# Altium schematic symbol library Integrated Circuits.SchLib: 166 symbols (part 2 of 2)

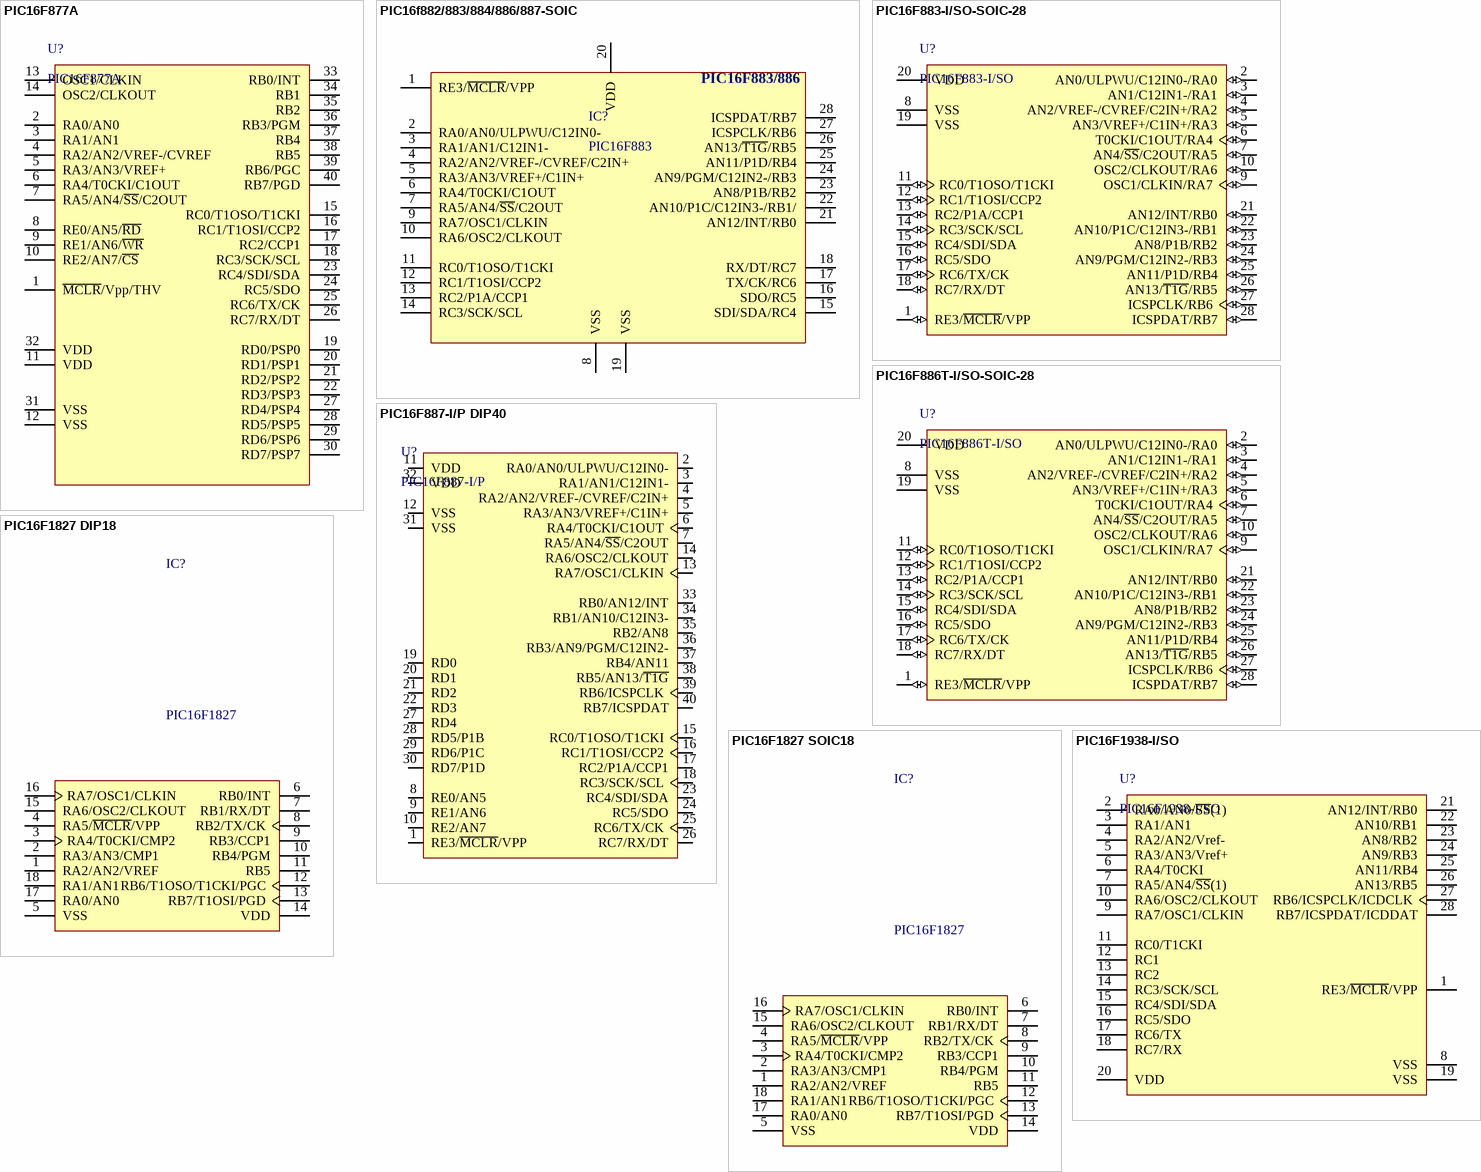
[diagram p5: symbols PIC16F877A to PIC16F1938-I/SO]

## PIC16F877A
designator U?
PIC16 Microcontrollers (MCU) 14KB 368 RAM 33 I/O; Code: 7204-037; ComponentLink1Description: Datasheet; ComponentLink2Description: Package Specification; ComponentLink3URL: Product URL:http://www.microchip.com/datasheet/PIC18F452; ComponentLink1URL: http://ww1.microchip.com/downloads/en/DeviceDoc/39564c.pdf; ComponentLink2URL: http://www.microchip.com/stellent/groups/techpub_sg/documents/packagingspec/en012702.pdf; ComponentLink3Description: URL Link1
footprint DIP_40DW (DIP, pitch 2.54mm, 600mil Width)
pins: 1 ~{MCLR}/Vpp/THV, 2 RA0/AN0, 3 RA1/AN1, 4 RA2/AN2/VREF-/CVREF, 5 RA3/AN3/VREF+, 6 RA4/T0CKI/C1OUT (power) "Ground reference for logic and I/O pins.", 7 RA5/AN4/~{SS}/C2OUT (power) "Positive supply for logic and I/O pins.", 8 RE0/AN5/~{RD}, 9 RE1/AN6/~{WR}, 10 RE2/AN7/~{CS}, 11 VDD, 12 VSS "These pins should be left unconnected.", 13 OSC1/CLKIN "These pins should be left unconnected.", 14 OSC2/CLKOUT "PORTB is a bi-directional I/O port. PORTB can be software programmed for internal weak pull-ups on all inputs. Digital I/O. Interrupt-on-change pin.", 15 RC0/T1OSO/T1CKI, 16 RC1/T1OSI/CCP2, 17 RC2/CCP1, 18 RC3/SCK/SCL, 19 RD0/PSP0, 20 RD1/PSP1, 21 RD2/PSP2, 22 RD3/PSP3, 23 RC4/SDI/SDA, 24 RC5/SDO, 25 RC6/TX/CK, 26 RC7/RX/DT, 27 RD4/PSP4, 28 RD5/PSP5 (power) "Positive supply for logic and I/O pins.", 29 RD6/PSP6 (power) "Ground reference for logic and I/O pins.", 30 RD7/PSP7, 31 VSS, 32 VDD, 33 RB0/INT "These pins should be left unconnected.", 34 RB1 "These pins should be left unconnected.", 35 RB2, 36 RB3/PGM, 37 RB4, 38 RB5, 39 RB6/PGC, 40 RB7/PGD

## PIC16f882/883/884/886/887-SOIC
designator IC?, comment PIC16F883
PIC16F883/886-SOIC28-Enhanced Flash-Based 8-Bit / CMOS Microcontrollers with / nanoWatt Technology; Designed by: TranLuyen; Code: N/A
footprint SOIC-28 (SOIC-28 Body 17.9x7.5x2.05mm, Pitch 1.27mm)
pins: 1 RE3/~{MCLR}/VPP, 2 RA0/AN0/ULPWU/C12IN0-, 3 RA1/AN1/C12IN1-, 4 RA2/AN2/VREF-/CVREF/C2IN+, 5 RA3/AN3/VREF+/C1IN+, 6 RA4/T0CKI/C1OUT, 7 RA5/AN4/~{SS}/C2OUT, 8 VSS, 9 RA7/OSC1/CLKIN, 10 RA6/OSC2/CLKOUT, 11 RC0/T1OSO/T1CKI, 12 RC1/T1OSI/CCP2, 13 RC2/P1A/CCP1, 14 RC3/SCK/SCL, 15 SDI/SDA/RC4, 16 SDO/RC5, 17 TX/CK/RC6, 18 RX/DT/RC7, 19 VSS, 20 VDD, 21 AN12/INT/RB0, 22 AN10/P1C/C12IN3-/RB1/, 23 AN8/P1B/RB2, 24 AN9/PGM/C12IN2-/RB3, 25 AN11/P1D/RB4, 26 AN13/~{T1G}/RB5, 27 ICSPCLK/RB6, 28 ICSPDAT/RB7
text: PIC16F883/886

## PIC16F883-I/SO-SOIC-28
designator U?, comment PIC16F883-I/SO
Flash-Based, 8-Bit CMOS Microcontroller with nanoWatt Technology, 8K (x14-Bit words) Program Memory, 624 Bytes Data Memory, 24 I/O pins, 28-Pin SOIC, Standard VDD Range, Industrial Temperature, Tape and Reel; Code: 7204-069; Designed by: TranLuyen; ComponentLink1Description: Datasheet; ComponentLink1URL: http://ww1.microchip.com/downloads/en/devicedoc/41291d.pdf
footprint SOIC-28 (SOIC-28 Body 17.9x7.5x2.05mm, Pitch 1.27mm)
pins: 1 RE3/~{MCLR}/VPP (io), 2 AN0/ULPWU/C12IN0-/RA0 (io), 3 AN1/C12IN1-/RA1 (io), 4 AN2/VREF-/CVREF/C2IN+/RA2 (io), 5 AN3/VREF+/C1IN+/RA3 (io), 6 T0CKI/C1OUT/RA4 (io), 7 AN4/~{SS}/C2OUT/RA5 (io), 8 VSS (power), 9 OSC1/CLKIN/RA7 (io), 10 OSC2/CLKOUT/RA6 (io), 11 RC0/T1OSO/T1CKI (io), 12 RC1/T1OSI/CCP2 (io), 13 RC2/P1A/CCP1 (io), 14 RC3/SCK/SCL (io), 15 RC4/SDI/SDA (io), 16 RC5/SDO (io), 17 RC6/TX/CK (io), 18 RC7/RX/DT (io), 19 VSS (power), 20 VDD (power), 21 AN12/INT/RB0 (io), 22 AN10/P1C/C12IN3-/RB1 (io), 23 AN8/P1B/RB2 (io), 24 AN9/PGM/C12IN2-/RB3 (io), 25 AN11/P1D/RB4 (io), 26 AN13/~{T1G}/RB5 (io), 27 ICSPCLK/RB6 (io), 28 ICSPDAT/RB7 (io)

## PIC16F886T-I/SO-SOIC-28
designator U?, comment PIC16F886T-I/SO
Flash-Based, 8-Bit CMOS Microcontroller with nanoWatt Technology, 8K (x14-Bit words) Program Memory, 624 Bytes Data Memory, 24 I/O pins, 28-Pin SOIC, Standard VDD Range, Industrial Temperature, Tape and Reel; Code: 7204-064; Designed by: TranLuyen; ComponentLink1Description: Datasheet; ComponentLink1URL: http://ww1.microchip.com/downloads/en/devicedoc/41291d.pdf
footprint SOIC-28 (SOIC-28 Body 17.9x7.5x2.05mm, Pitch 1.27mm)
pins: 1 RE3/~{MCLR}/VPP (io), 2 AN0/ULPWU/C12IN0-/RA0 (io), 3 AN1/C12IN1-/RA1 (io), 4 AN2/VREF-/CVREF/C2IN+/RA2 (io), 5 AN3/VREF+/C1IN+/RA3 (io), 6 T0CKI/C1OUT/RA4 (io), 7 AN4/~{SS}/C2OUT/RA5 (io), 8 VSS (power), 9 OSC1/CLKIN/RA7 (io), 10 OSC2/CLKOUT/RA6 (io), 11 RC0/T1OSO/T1CKI (io), 12 RC1/T1OSI/CCP2 (io), 13 RC2/P1A/CCP1 (io), 14 RC3/SCK/SCL (io), 15 RC4/SDI/SDA (io), 16 RC5/SDO (io), 17 RC6/TX/CK (io), 18 RC7/RX/DT (io), 19 VSS (power), 20 VDD (power), 21 AN12/INT/RB0 (io), 22 AN10/P1C/C12IN3-/RB1 (io), 23 AN8/P1B/RB2 (io), 24 AN9/PGM/C12IN2-/RB3 (io), 25 AN11/P1D/RB4 (io), 26 AN13/~{T1G}/RB5 (io), 27 ICSPCLK/RB6 (io), 28 ICSPDAT/RB7 (io)

## PIC16F887-I/P DIP40
designator U?, comment PIC16F887-I/P
Flash-Based, 8-Bit CMOS Microcontroller with nanoWatt Technology, 8K (x14-Bit words) Program Memory, 624 Bytes Data Memory, 35 I/O pins, 40-Pin PDIP, Standard VDD Range, Industrial Temperature; Code: 7204-039; Code_sub1: 5401-013
footprint DIP_40DW (DIP, pitch 2.54mm, 600mil Width)
pins: 1 RE3/~{MCLR}/VPP, 2 RA0/AN0/ULPWU/C12IN0-, 3 RA1/AN1/C12IN1-, 4 RA2/AN2/VREF-/CVREF/C2IN+, 5 RA3/AN3/VREF+/C1IN+, 6 RA4/T0CKI/C1OUT, 7 RA5/AN4/~{SS}/C2OUT, 8 RE0/AN5, 9 RE1/AN6, 10 RE2/AN7, 11 VDD, 12 VSS, 13 RA7/OSC1/CLKIN, 14 RA6/OSC2/CLKOUT, 15 RC0/T1OSO/T1CKI, 16 RC1/T1OSI/CCP2, 17 RC2/P1A/CCP1, 18 RC3/SCK/SCL, 19 RD0, 20 RD1, 21 RD2, 22 RD3, 23 RC4/SDI/SDA, 24 RC5/SDO, 25 RC6/TX/CK, 26 RC7/RX/DT, 27 RD4, 28 RD5/P1B, 29 RD6/P1C, 30 RD7/P1D, 31 VSS, 32 VDD, 33 RB0/AN12/INT, 34 RB1/AN10/C12IN3-, 35 RB2/AN8, 36 RB3/AN9/PGM/C12IN2-, 37 RB4/AN11, 38 RB5/AN13/~{T1G}, 39 RB6/ICSPCLK, 40 RB7/ICSPDAT

## PIC16F1827 DIP18
designator IC?, comment PIC16F1827
16F1827 DIP18, nho xuat de (IC18 5401-005); Code: 7204-045; Code_sub1: 5401-005
footprint DIP_18 (DIP, pitch 2.54mm, 300mil Width)
pins: 1 RA2/AN2/VREF, 2 RA3/AN3/CMP1, 3 RA4/T0CKI/CMP2, 4 RA5/~{MCLR}/VPP, 5 VSS, 6 RB0/INT, 7 RB1/RX/DT, 8 RB2/TX/CK, 9 RB3/CCP1, 10 RB4/PGM, 11 RB5, 12 RB6/T1OSO/T1CKI/PGC, 13 RB7/T1OSI/PGD, 14 VDD, 15 RA6/OSC2/CLKOUT, 16 RA7/OSC1/CLKIN, 17 RA0/AN0, 18 RA1/AN1

## PIC16F1827 SOIC18
designator IC?, comment PIC16F1827
PIC 16F1827 SOIC18; Code: 7204-045-2
footprint SO_18_W (SOP, SOIC, 7.5mm width, 1.27mm pitch,)
pins: 1 RA2/AN2/VREF, 2 RA3/AN3/CMP1, 3 RA4/T0CKI/CMP2, 4 RA5/~{MCLR}/VPP, 5 VSS, 6 RB0/INT, 7 RB1/RX/DT, 8 RB2/TX/CK, 9 RB3/CCP1, 10 RB4/PGM, 11 RB5, 12 RB6/T1OSO/T1CKI/PGC, 13 RB7/T1OSI/PGD, 14 VDD, 15 RA6/OSC2/CLKOUT, 16 RA7/OSC1/CLKIN, 17 RA0/AN0, 18 RA1/AN1

## PIC16F1938-I/SO
designator U?
Flash-Based, 8-Bit CMOS Microcontroller with LCD Driver with nanoWatt XLP Technology, 32 MHz, 24 I/O, -40 to 85 degC, 28-pin SOIC (SO28), Tube; Manufacturer: Microchip; EEPROM Data Memory (bytes): 256; Internal Oscillator: 32 MHz, 31 kHz; Program Memory KWords: 16; I/O Pins: 24; RAM: 1024; Max. CPU Speed MHz: 32; Operation Voltage Range: 1.8V - 5.5V; Digital Communication: 1 -A/E/USART, 1 -MSSP(SPI/I2C); Timers: 4 - 8-bit, 1 - 16-bit, 0 - 32-bit; Program Memory KBytes: 28; # of A/D Channels: 11; Memory Type: Flash; Code: 7204-236; PartNumber: PIC16F1938-I/SO; ComponentLink1Description: Datasheet; ComponentLink2Description: Package Specification; DatasheetVersion: Rev. B; ComponentLink3URL: Product URL:http://www.microchip.com/datasheet/PIC16F1938; ComponentLink1URL: http://ww1.microchip.com/downloads/en/DeviceDoc/41574B.pdf; Packing: TUBE; ComponentLink2URL: http://www.microchip.com/stellent/groups/techpub_sg/documents/packagingspec/en012702.pdf; PackageReference: SOIC-SO28; ComponentLink3Description: URL Link1; PackageVersion: C04-052C, 12/2012; RoHS: TRUE; Mounting Technology: Surface Mount; PackageDescription: 28-Lead Plastic Small Outline, 17.9 x 7.5 mm Body, 1.27 mm Pitch
footprint SOIC-28 (SOIC-28 Body 17.9x7.5x2.05mm, Pitch 1.27mm)
pins: 1 RE3/~{MCLR}/VPP, 2 RA0/AN0/~{SS}(1), 3 RA1/AN1, 4 RA2/AN2/Vref-, 5 RA3/AN3/Vref+, 6 RA4/T0CKI, 7 RA5/AN4/~{SS}(1), 8 VSS "Ground reference.", 9 RA7/OSC1/CLKIN, 10 RA6/OSC2/CLKOUT, 11 RC0/T1CKI, 12 RC1, 13 RC2, 14 RC3/SCK/SCL, 15 RC4/SDI/SDA, 16 RC5/SDO, 17 RC6/TX, 18 RC7/RX, 19 VSS "Ground reference.", 20 VDD "Positive supply.", 21 AN12/INT/RB0, 22 AN10/RB1, 23 AN8/RB2, 24 AN9/RB3, 25 AN11/RB4, 26 AN13/RB5, 27 RB6/ICSPCLK/ICDCLK, 28 RB7/ICSPDAT/ICDDAT

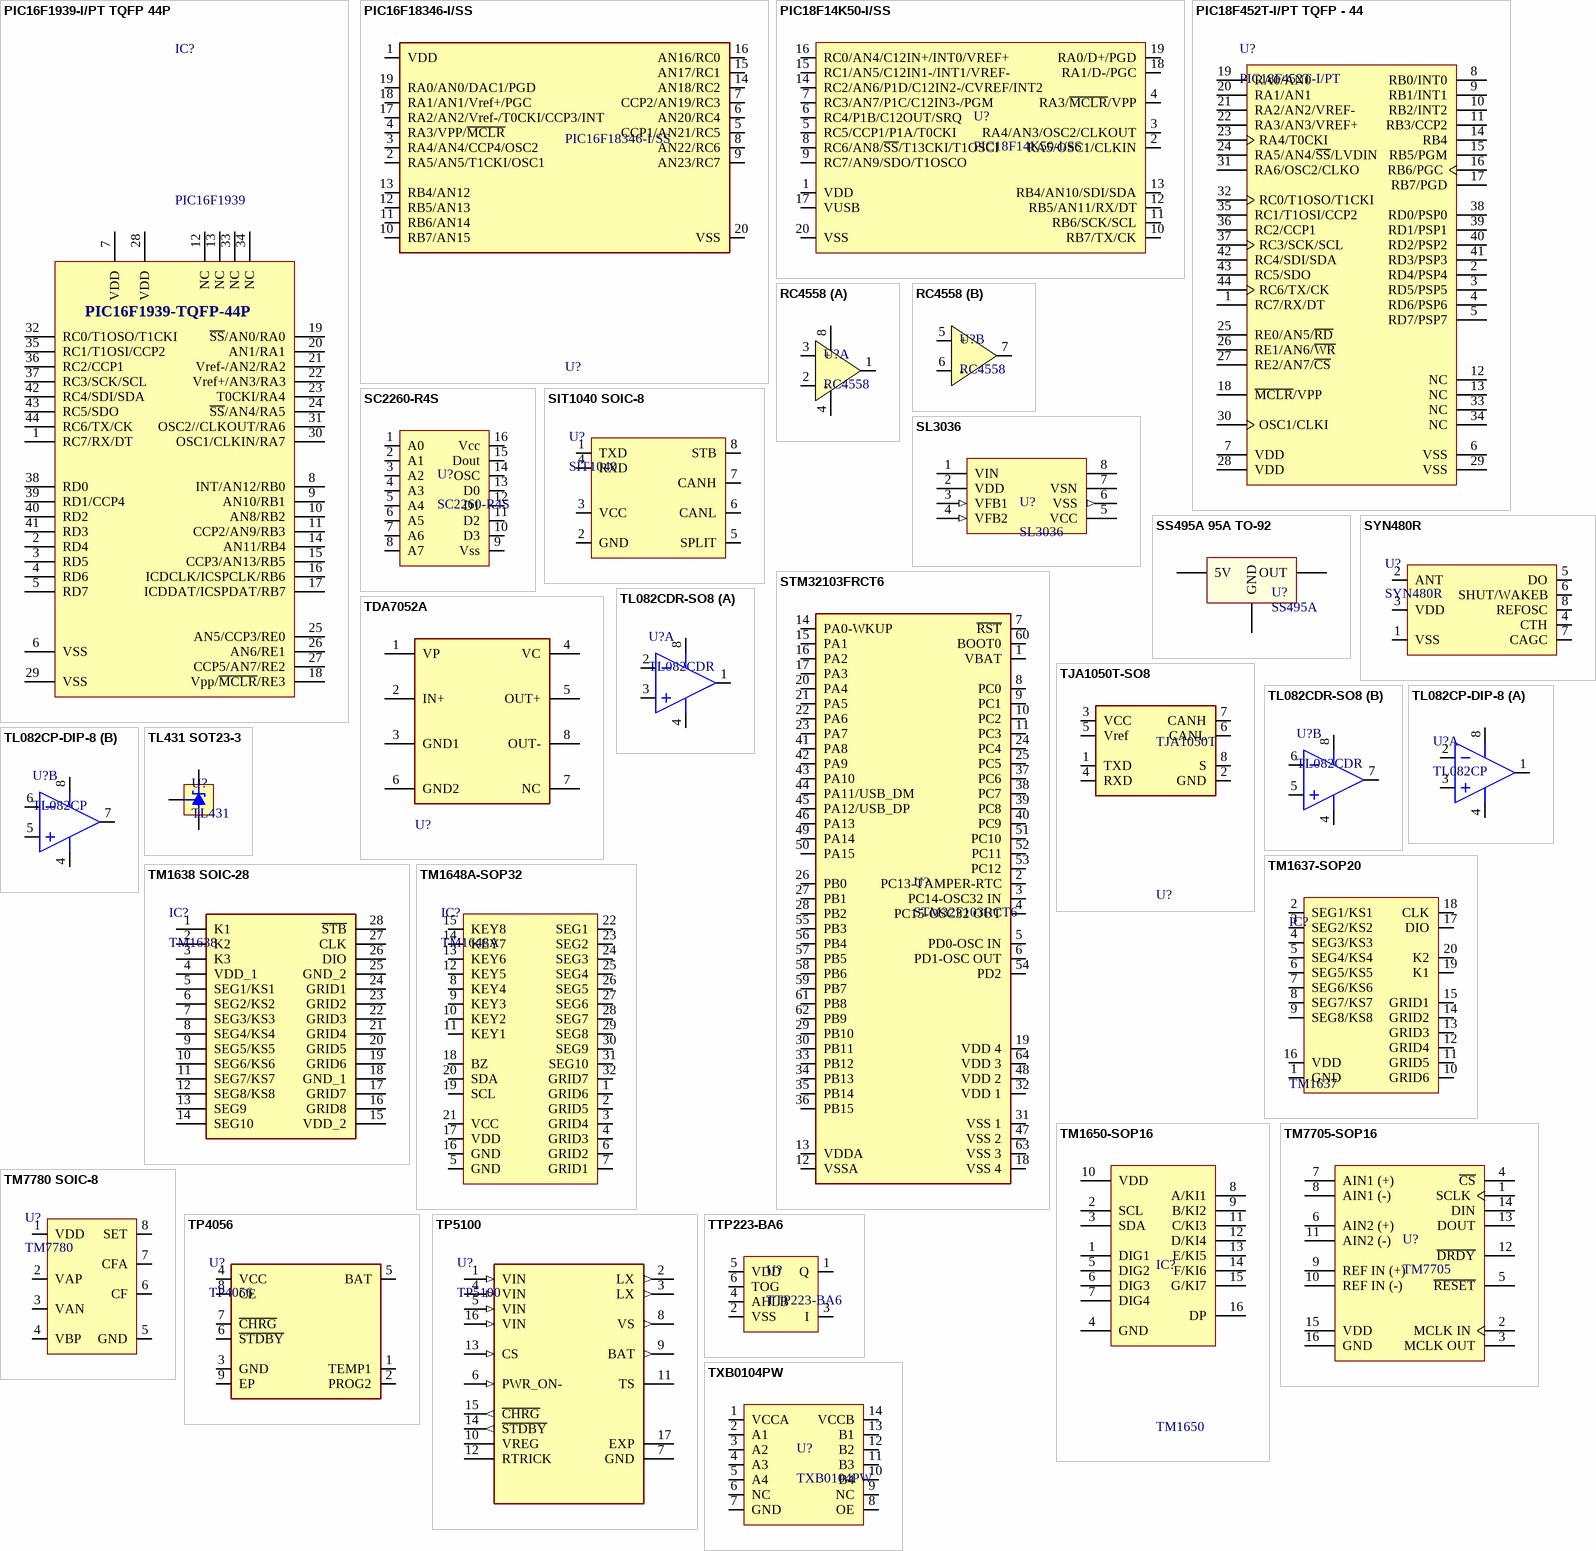
[diagram p6: symbols PIC16F1939-I/PT TQFP 44P to TXB0104PW]

## PIC16F1939-I/PT TQFP 44P
designator IC?, comment PIC16F1939
PIC16F1939-I/PT 44P-TQFP; Code: 7204-239; Designed by: TranLuyen
footprint QFG80_44 (TQFP44, PQFP44, A44 (Cypress), QFP44/MQFP44N (Dallas), VQ44,VQG44 (Xilinx), MS-026ACB, MS-022AB(JEDEC), 44A, 10X10, 0.8mm)
pins: 1 RC7/RX/DT, 2 RD4, 3 RD5, 4 RD6, 5 RD7, 6 VSS (power), 7 VDD (power), 8 INT/AN12/RB0, 9 AN10/RB1, 10 AN8/RB2, 11 CCP2/AN9/RB3, 12 NC, 13 NC, 14 AN11/RB4, 15 CCP3/AN13/RB5, 16 ICDCLK/ICSPCLK/RB6, 17 ICDDAT/ICSPDAT/RB7, 18 Vpp/~{MCLR}/RE3, 19 ~{SS}/AN0/RA0, 20 AN1/RA1, 21 Vref-/AN2/RA2, 22 Vref+/AN3/RA3, 23 T0CKI/RA4, 24 ~{SS}/AN4/RA5, 25 AN5/CCP3/RE0, 26 AN6/RE1, 27 CCP5/AN7/RE2, 28 VDD (power), 29 VSS (power), 30 OSC1/CLKIN/RA7, 31 OSC2//CLKOUT/RA6, 32 RC0/T1OSO/T1CKI, 33 NC, 34 NC, 35 RC1/T1OSI/CCP2, 36 RC2/CCP1, 37 RC3/SCK/SCL, 38 RD0, 39 RD1/CCP4, 40 RD2, 41 RD3, 42 RC4/SDI/SDA, 43 RC5/SDO, 44 RC6/TX/CK
text: PIC16F1939-TQFP-44P

## PIC16F18346-I/SS
designator U?
IC MCU 8BIT 28KB FLASH 20SSOP; Code: N/A
footprint SOG65_20_W (SSOP20, TSSOP20, RU-20, RQ-20, DB, pitch: 0.65mm, 7X5.3mm, QSP, SOT339-1, SOT266-1, AT-260, TSSO6X6-G20, NP20, MO-153AC, MO-150AE, MO-137-AD, MO-152)
pins: 1 VDD, 2 RA5/AN5/T1CKI/OSC1, 3 RA4/AN4/CCP4/OSC2, 4 RA3/VPP/~{MCLR}, 5 CCP1/AN21/RC5, 6 AN20/RC4, 7 CCP2/AN19/RC3, 8 AN22/RC6, 9 AN23/RC7, 10 RB7/AN15, 11 RB6/AN14, 12 RB5/AN13, 13 RB4/AN12, 14 AN18/RC2, 15 AN17/RC1, 16 AN16/RC0, 17 RA2/AN2/Vref-/T0CKI/CCP3/INT, 18 RA1/AN1/Vref+/PGC, 19 RA0/AN0/DAC1/PGD, 20 VSS

## PIC18F14K50-I/SS
designator U?
USB Flash Microcontroller with nanoWatt XLP Technology, 20-pin SSOP, Industrial Temperature; Code: 7204-245; Desinged by: TranLuyen
footprint SOG65_20_W (SSOP20, TSSOP20, RU-20, RQ-20, DB, pitch: 0.65mm, 7X5.3mm, QSP, SOT339-1, SOT266-1, AT-260, TSSO6X6-G20, NP20, MO-153AC, MO-150AE, MO-137-AD, MO-152)
pins: 1 VDD, 2 RA5/OSC1/CLKIN, 3 RA4/AN3/OSC2/CLKOUT, 4 RA3/~{MCLR}/VPP, 5 RC5/CCP1/P1A/T0CKI, 6 RC4/P1B/C12OUT/SRQ, 7 RC3/AN7/P1C/C12IN3-/PGM, 8 RC6/AN8/~{SS}/T13CKI/T1OSCI, 9 RC7/AN9/SDO/T1OSCO, 10 RB7/TX/CK, 11 RB6/SCK/SCL, 12 RB5/AN11/RX/DT, 13 RB4/AN10/SDI/SDA, 14 RC2/AN6/P1D/C12IN2-/CVREF/INT2, 15 RC1/AN5/C12IN1-/INT1/VREF-, 16 RC0/AN4/C12IN+/INT0/VREF+, 17 VUSB, 18 RA1/D-/PGC, 19 RA0/D+/PGD, 20 VSS

## PIC18F452T-I/PT TQFP - 44
designator U?, comment PIC18F452T-I/PT
High Performance, Enhanced Flash Microcontroller with 10-Bit A/D, 40 MHz, 34 I/O, -40 to 85 degC, 44-pin TQFP (PT44), Tape and Reel; Manufacturer: Microchip; EEPROM Data Memory (bytes): 256; Program Memory KWords: 16; I/O Pins: 34; RAM: 1536; Max. CPU Speed MHz: 40; Packing: T/R; Operation Voltage Range: 2V - 5.5V; Digital Communication: 0 -UART, 1 -A/E/USART, 0 -SPI, 0 -I2C, 1 -MSSP(SPI/I2C); Timers: 1 - 8-bit, 3 - 16-bit, 0 - 32-bit; Program Memory KBytes: 32; # of A/D Channels: 8; Code: 7204-103; Designed by: TranLuyen; PartNumber: PIC18F452T-I/PT; ComponentLink1Description: Datasheet; ComponentLink2Description: Package Specification; ComponentLink3URL: Product URL:http://www.microchip.com/datasheet/PIC18F452; ComponentLink1URL: http://ww1.microchip.com/downloads/en/DeviceDoc/39564c.pdf; ComponentLink2URL: http://www.microchip.com/stellent/groups/techpub_sg/documents/packagingspec/en012702.pdf; ComponentLink3Description: URL Link1; PackageVersion: C04-076B, 12/2012; RoHS: TRUE; Memory Type: Flash; Mounting Technology: Surface Mount; PackageReference: TQFP-PT44; PackageDescription: 44-Lead Plastic Thin Quad Flatpack, 10 x 10 mm Body, 0.8 mm Pitch
footprint QFG80_44 (TQFP44, PQFP44, A44 (Cypress), QFP44/MQFP44N (Dallas), VQ44,VQG44 (Xilinx), MS-026ACB, MS-022AB(JEDEC), 44A, 10X10, 0.8mm)
pins: 1 RC7/RX/DT, 2 RD4/PSP4, 3 RD5/PSP5, 4 RD6/PSP6, 5 RD7/PSP7, 6 VSS (power) "Ground reference for logic and I/O pins.", 7 VDD (power) "Positive supply for logic and I/O pins.", 8 RB0/INT0, 9 RB1/INT1, 10 RB2/INT2, 11 RB3/CCP2, 12 NC "These pins should be left unconnected.", 13 NC "These pins should be left unconnected.", 14 RB4 "PORTB is a bi-directional I/O port. PORTB can be software programmed for internal weak pull-ups on all inputs. Digital I/O. Interrupt-on-change pin.", 15 RB5/PGM, 16 RB6/PGC, 17 RB7/PGD, 18 ~{MCLR}/VPP, 19 RA0/AN0, 20 RA1/AN1, 21 RA2/AN2/VREF-, 22 RA3/AN3/VREF+, 23 RA4/T0CKI, 24 RA5/AN4/~{SS}/LVDIN, 25 RE0/AN5/~{RD}, 26 RE1/AN6/~{WR}, 27 RE2/AN7/~{CS}, 28 VDD (power) "Positive supply for logic and I/O pins.", 29 VSS (power) "Ground reference for logic and I/O pins.", 30 OSC1/CLKI, 31 RA6/OSC2/CLKO, 32 RC0/T1OSO/T1CKI, 33 NC "These pins should be left unconnected.", 34 NC "These pins should be left unconnected.", 35 RC1/T1OSI/CCP2, 36 RC2/CCP1, 37 RC3/SCK/SCL, 38 RD0/PSP0, 39 RD1/PSP1, 40 RD2/PSP2, 41 RD3/PSP3, 42 RC4/SDI/SDA, 43 RC5/SDO, 44 RC6/TX/CK

## RC4558
designator U?
RC4558 Dual General-Purpose Operational Amplifier; Code: 5011-057
footprint SO_8 (SOP-8, 5x3.9mm body 1.27mm pitch, SOT96-1, M08A, S8, SOIC8, VO8, MS-012AA(JEDEC), R-8, 8S2, VOG8)
part A pins: 1, 2 -, 3 +, 4, 8
part B pins: 5 +, 6 -, 7

## SC2260-R4S
designator U?
SC2260-R4S / Remote Control Encoder; Code: 5015-136
footprint SO_16 (SOP, SOIC, 3.9mm width, 1.27mm pitch,)
pins: 1 A0, 2 A1, 3 A2, 4 A3, 5 A4, 6 A5, 7 A6, 8 A7, 9 Vss, 10 D3, 11 D2, 12 D1, 13 D0, 14 OSC, 15 Dout, 16 Vcc

## SIT1040 SOIC-8
designator U?, comment SIT1040
5V，±40V BUS Protection，1Mbps High Speed CAN transceiver; Code: N/A
footprint SO_8 (SOP-8, 5x3.9mm body 1.27mm pitch, SOT96-1, M08A, S8, SOIC8, VO8, MS-012AA(JEDEC), R-8, 8S2, VOG8)
pins: 1 TXD, 2 GND, 3 VCC, 4 RXD, 5 SPLIT, 6 CANL, 7 CANH, 8 STB

## SL3036
designator U?
Designed by: nhox; Code: 5010-015-1
footprint SO_8 (SOP-8, 5x3.9mm body 1.27mm pitch, SOT96-1, M08A, S8, SOIC8, VO8, MS-012AA(JEDEC), R-8, 8S2, VOG8)
pins: 1 VIN, 2 VDD, 3 VFB1 (in), 4 VFB2 (in), 5 VCC, 6 VSS (out), 7 VSN, 8 VSP

## SS495A 95A TO-92
designator U?, comment SS495A
SS495A 95A TO-92 IC hall; Code: N/A
footprint QTO-92 (TO-92)
pins: 1 5V, 2 GND, 3 OUT

## STM32103FRCT6
designator U?, comment STM32F103RCT6
STM32F103RCT6, LQFP64; Code: 7203-028; Designed by: Nhox
footprint QFG50_64 (A64 (CYPRESS), TQFP64, LQFP64, VQ44, VQG44, 10X10mm, Pitch: 0.5mm)
pins: 1 VBAT, 2 PC13-TAMPER-RTC, 3 PC14-OSC32 IN, 4 PC15-OSC32 OUT, 5 PD0-OSC IN, 6 PD1-OSC OUT, 7 ~{RST}, 8 PC0, 9 PC1, 10 PC2, 11 PC3, 12 VSSA, 13 VDDA, 14 PA0-WKUP, 15 PA1, 16 PA2, 17 PA3, 18 VSS 4, 19 VDD 4, 20 PA4, 21 PA5, 22 PA6, 23 PA7, 24 PC4, 25 PC5, 26 PB0, 27 PB1, 28 PB2, 29 PB10, 30 PB11, 31 VSS 1, 32 VDD 1, 33 PB12, 34 PB13, 35 PB14, 36 PB15, 37 PC6, 38 PC7, 39 PC8, 40 PC9, 41 PA8, 42 PA9, 43 PA10, 44 PA11/USB_DM, 45 PA12/USB_DP, 46 PA13, 47 VSS 2, 48 VDD 2, 49 PA14, 50 PA15, 51 PC10, 52 PC11, 53 PC12, 54 PD2, 55 PB3, 56 PB4, 57 PB5, 58 PB6, 59 PB7, 60 BOOT0, 61 PB8, 62 PB9, 63 VSS 3, 64 VDD 3

## SYN480R
designator U?
300-450MHz ASK Receiver, 433Mhz => OSC 6.7458Mhz, 315Mhz => OSC 4.8970Mhz; Code: 5015-171; Designed by: Nhox
footprint SO_8 (SOP-8, 5x3.9mm body 1.27mm pitch, SOT96-1, M08A, S8, SOIC8, VO8, MS-012AA(JEDEC), R-8, 8S2, VOG8)
pins: 1 VSS, 2 ANT, 3 VDD, 4 CTH, 5 DO, 6 SHUT/WAKEB, 7 CAGC, 8 REFOSC

## TDA7052A
designator U?  (value not drawn)
LINEAR INTEGRATED CIRCUIT; Code: N/A
footprint DIP_8 (DIP, pitch 2.54mm, 300mil Width)
pins: 1 VP, 2 IN+, 3 GND1, 4 VC, 5 OUT+, 6 GND2, 7 NC, 8 OUT-

## TJA1050T-SO8
designator U?, comment TJA1050T
High speed CAN transceiver; Code: 5008-009; Designed by: TranLuyen
footprint SO_8 (SOP-8, 5x3.9mm body 1.27mm pitch, SOT96-1, M08A, S8, SOIC8, VO8, MS-012AA(JEDEC), R-8, 8S2, VOG8)
pins: 1 TXD, 2 GND, 3 VCC, 4 RXD, 5 Vref, 6 CANL, 7 CANH, 8 S

## TL082CDR-SO8
designator U?, comment TL082CDR
JFET-Input Operational Amplifier, 7 to 36 V, 0 to 70 degC, 8-pin SOIC (D8), Green (RoHS & no Sb/Br); Code: 5003-010; Designed by: TranLuyen; ComponentLink2URL: http://www.ti.com/lit/ds/symlink/tl082.pdf; ComponentLink2Description: Datasheet
footprint SO_8 (SOP-8, 5x3.9mm body 1.27mm pitch, SOT96-1, M08A, S8, SOIC8, VO8, MS-012AA(JEDEC), R-8, 8S2, VOG8)
pins on every part: 4 VCC-, 8 VCC+
part A pins: 1 OUT1, 2 IN1-, 3 IN1+
part B pins: 5 IN2+, 6 IN2-, 7 OUT2

## TL082CP-DIP-8
designator U?, comment TL082CP
Wide Bandwidth Dual JFET Input Operational Amplifier (Op-am), 8-pin MDIP; Code: 5003-039; Designed by: TranLuyen; PartNumber: TL082CP
footprint DIP_8 (DIP, pitch 2.54mm, 300mil Width)
part A pins: 1 OUT1, 2 IN1-, 3 IN1+, 4 VCC-, 8 VCC+
part B pins: 4 VCC-, 5 IN2+, 6 IN2-, 7 OUT2, 8 VCC+

## TL431 SOT23-3
designator U?, comment TL431
TL431, Precision Programmable Reference; Code: 5102-002
footprint SOT23_N NXP (SOT23, 3-Leads, Body 3x1.4mm, Pitch 0.95mm, IPC Medium Density)
pins: 1 K, 2 R, 3 A

## TM1637-SOP20
designator IC?, comment TM1637
LED Drive Control Special Circuit; Code: 5007-048; Designed by: TranLuyen
footprint SO_20_W (SOP, SOIC, 7.5mm width, 1.27mm pitch,)
pins: 1 GND, 2 SEG1/KS1, 3 SEG2/KS2, 4 SEG3/KS3, 5 SEG4/KS4, 6 SEG5/KS5, 7 SEG6/KS6, 8 SEG7/KS7, 9 SEG8/KS8, 10 GRID6, 11 GRID5, 12 GRID4, 13 GRID3, 14 GRID2, 15 GRID1, 16 VDD, 17 DIO, 18 CLK, 19 K1, 20 K2

## TM1638 SOIC-28
designator IC?, comment TM1638
Special circuit for LED drive control; Code: 5007-123; Designed by: TranLuyen; ComponentLink1Description: datasheet; ComponentLink1URL: https://www.futurashop.it/image/catalog/data/Download/TM1638_V1.3_EN.pdf
footprint SO_28_W (SOP, SOIC, 7.5mm width, 1.27mm pitch,)
pins: 1 K1, 2 K2, 3 K3, 4 VDD_1, 5 SEG1/KS1, 6 SEG2/KS2, 7 SEG3/KS3, 8 SEG4/KS4, 9 SEG5/KS5, 10 SEG6/KS6, 11 SEG7/KS7, 12 SEG8/KS8, 13 SEG9, 14 SEG10, 15 VDD_2, 16 GRID8, 17 GRID7, 18 GND_1, 19 GRID6, 20 GRID5, 21 GRID4, 22 GRID3, 23 GRID2, 24 GRID1, 25 GND_2, 26 DIO, 27 CLK, 28 ~{STB}

## TM1648A-SOP32
designator IC?, comment TM1648A
LED drive IC TM1648A with touch key, 10seg x 7grid, 13seg x 4grid; Designed by: Nhox; Code: N/A
footprint SO_32_21X11
pins: 1 GRID6, 2 GRID5, 3 GRID4, 4 GRID3, 5 GND, 6 GRID2, 7 GRID1, 8 KEY4, 9 KEY3, 10 KEY2, 11 KEY1, 12 KEY5, 13 KEY6, 14 KEY7, 15 KEY8, 16 GND, 17 VDD, 18 BZ, 19 SCL, 20 SDA, 21 VCC, 22 SEG1, 23 SEG2, 24 SEG3, 25 SEG4, 26 SEG5, 27 SEG6, 28 SEG7, 29 SEG8, 30 SEG9, 31 SEG10, 32 GRID7

## TM1650-SOP16
designator IC?, comment TM1650
TM1650 LED 7SEG SOP16-9.9x3.9mm, 1.27mm; Code: 5015-046; Designed by: TranLuyen
footprint SO_16 (SOP, SOIC, 3.9mm width, 1.27mm pitch,)
pins: 1 DIG1, 2 SCL, 3 SDA, 4 GND, 5 DIG2, 6 DIG3, 7 DIG4, 8 A/KI1, 9 B/KI2, 10 VDD, 11 C/KI3, 12 D/KI4, 13 E/KI5, 14 F/KI6, 15 G/KI7, 16 DP

## TM7705-SOP16
designator U?, comment TM7705
Dual 16-Bit Sigma-Delta Analog-to-Digital Converter with Serial, SPI Interface, 1 mW, 3 V / 5 V; Code: 5006-030; Designed by: TranLuyen; ComponentLink4Description: Product URL; ComponentLink1Description: Manufacturer URL; ComponentLink2Description: Datasheet; ComponentLink2URL: https://datasheet.lcsc.com/lcsc/1811151540_TM-Shenzhen-Titan-Micro-Elec-TM7705_C77545.pdf
footprint SO_16 (SOP, SOIC, 3.9mm width, 1.27mm pitch,)
pins: 1 SCLK "Serial Clock. An external serial clock is applied to the Schmitt-triggered logic input to access serialdata from the AD7705/AD7706. This serial clock can be a continuous clock with all data transmitted ina continuous train (See Datasheet)", 2 MCLK IN "Master Clock Signal. This can be provided in the form of a crystal/resonator or external clock. Acrystal/resonator can be tied across the Pin MCLK IN and Pin MCLK OUT. Alternatively, the MCLK IN pin can be driven with a (See Datasheet)", 3 MCLK OUT "When the master clock for these devices is a crystal/resonator, the crystal/resonator is connected between Pin MCLK IN and Pin MCLK OUT. If an external clock is applied to Pin MCLK IN, Pin MCLK OUT provides an inverted clock (See Datasheet)", 4 ~{CS} "Chip Select. Active low logic input used to select the AD7705/AD7706. With this input hardwired low, the AD7705/AD7706 can operate in its 3-wire interface mode with Pin SCLK, Pin DIN, and Pin DOUT used to interface to the (See Datasheet)", 5 ~{RESET} "Logic Input. Active low input that resets the control logic, interface logic, calibration coefficients, digital filter, and analog modulator of the parts to power-on status", 6 AIN2 (+) "Positive Input of the Differential Analog Input Pair AIN2(+)/AIN2(-) for AD7705. Channel 1 for AD7706.", 7 AIN1 (+) "Positive Input of the Differential Analog Input Pair AIN1(+)/AIN1(-) for AD7705. Channel 2 for AD7706.", 8 AIN1 (-) "Negative Input of the Differential Analog Input Pair AIN1(+)/AIN1(-) for AD7705. COMMON input for AD7706 with Channel 1, Channel 2, and Channel 3 referenced to this input", 9 REF IN (+) "Reference Input. Positive input of the differential reference input to the AD7705/AD7706. The reference input is differential with the provision that REF IN(+) must be greater than REF IN(-) REF IN(+) can lie anywhere (See Datasheet)", 10 REF IN (-) "Reference Input. Negative input of the differential reference input to the AD7705/AD7706. The REF IN(-) can lie anywhere between VDD and GND, provided that REF IN(+) is greater than REF IN(-).", 11 AIN2 (-) "Negative Input of the Differential Analog Input Pair AIN2(+)/AIN2(-) for AD7705. Channel 3 for AD7706.", 12 ~{DRDY} "Logic Output. A logic low on this output indicates that a new output word is available from the AD7705/AD7706 data register. The D\R\D\Y\ pin returns high upon completion of a read operation of a full output word. If no data (See Datasheet)", 13 DOUT "Serial Data Output. Serial data is read from the output shift register on the part. The output shift register can contain information from the setup register, communication register, clock register, or data register, (See Datasheet)", 14 DIN "Serial Data Input. Serial data is written to the input shift register on the part. Data from the input shift register is transferred to the setup register, clock register, or communication register, depending on  the (See Datasheet)", 15 VDD "Supply Voltage. 2.7 V to 5.25 V operation.", 16 GND "Ground Reference Point for the AD7705/AD7706 Internal Circuitry"

## TM7780 SOIC-8
designator U?, comment TM7780
TM7780 is a single-phase metering chip.; Designed by: TranLuyen; Erase IC: Erase; Code: N/A; LCSC Part: C5174545
footprint SO_8 (SOP-8, 5x3.9mm body 1.27mm pitch, SOT96-1, M08A, S8, SOIC8, VO8, MS-012AA(JEDEC), R-8, 8S2, VOG8)
pins: 1 VDD "Positive pole of power supply", 2 VAP "Current differential signal input terminal", 3 VAN "Current differential signal input terminal", 4 VBP "Voltage signal positive input terminal", 5 GND "Negative pole of power supply", 6 CF "output power pulse", 7 CFA "SET is connected to GND, and the effective value of the current is output. SET is connected to VDD, and the effective value of the voltage is output.", 8 SET "Select foot, built-in drop-down"

## TP4056
designator U?
1A Standalone Linear Li-lon Battery Charger; Code: 5016-002; Designed by: TranLuyen
footprint SO_8T (SOP-8, 5x3.9mm body 1.27mm pitch, DDA, SO PowerPAD)
pins: 1 TEMP1, 2 PROG2, 3 GND, 4 VCC, 5 BAT, 6 ~{STDBY}, 7 ~{CHRG}, 8 CE, 9 EP

## TP5100
designator U?
2A-switch buck 8.4V / 4.2V rechargeable lithium battery
footprint QFN16 (4mm * 4mm 16 Pin QFN Package)
pins: 1 VIN (in), 2 LX (out), 3 LX (out), 4 VIN (in), 5 VIN (in), 6 PWR_ON- (in), 7 GND (power), 8 VS (out), 9 BAT (out), 10 VREG, 11 TS, 12 RTRICK, 13 CS (in), 14 ~{STDBY} (out), 15 ~{CHRG} (out), 16 VIN (in), 17 EXP

## TTP223-BA6
designator U?
TTP223-BA6, TTP223N-BA6, TonTouch TM; Code: 5015-162
footprint SOT-23-6
pins: 1 Q, 2 VSS, 3 I, 4 AHLB, 5 VDD, 6 TOG

## TXB0104PW
designator U?
YE04 TSSOP-14; Code: N/A
footprint SOG65_14 (PW TSSOP (TI), MO-153-AB (JEDEC), 14Lead, pitch: 0.65mm, 5x4.4x1.2mm)
pins: 1 VCCA (power), 2 A1, 3 A2, 4 A3, 5 A4, 6 NC, 7 GND (power), 8 OE, 9 NC, 10 B4, 11 B3, 12 B2, 13 B1, 14 VCCB (power)

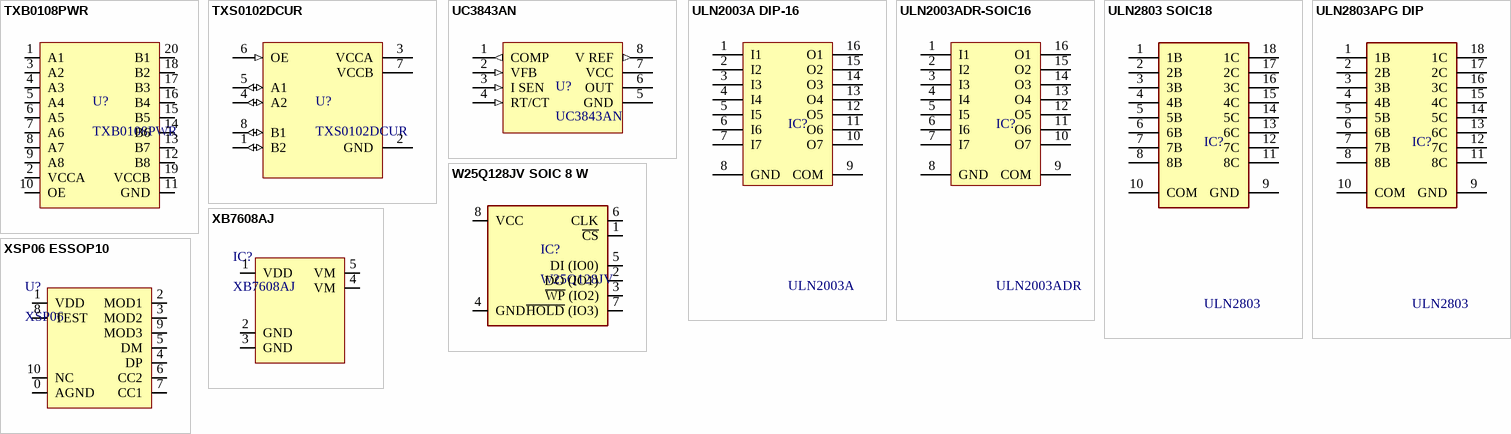
[diagram p7: symbols TXB0108PWR to XSP06 ESSOP10]

## TXB0108PWR
designator U?
YE08 TSSOP-20; Code: 5015-118
footprint SOG65_20 (PW TSSOP (TI), MO-153-AC (JEDEC), 20Lead, pitch: 0.65mm, 6.5x4.4x1.2mm)
pins: 1 A1, 2 VCCA, 3 A2, 4 A3, 5 A4, 6 A5, 7 A6, 8 A7, 9 A8, 10 OE, 11 GND, 12 B8, 13 B7, 14 B6, 15 B5, 16 B4, 17 B3, 18 B2, 19 VCCB, 20 B1

## TXS0102DCUR
designator U?
TXS0102 2-Bit Bidirectional Voltage-Level Translator for Open-Drain and Push-Pull Applications
footprint VSSOP-8
pins: 1 B2 (io), 2 GND, 3 VCCA, 4 A2 (io), 5 A1 (io), 6 OE (in), 7 VCCB, 8 B1 (io)

## UC3843AN
designator U?
UCx84xA Current-Mode PWM Controller
footprint SO_8 (SOP-8, 5x3.9mm body 1.27mm pitch, SOT96-1, M08A, S8, SOIC8, VO8, MS-012AA(JEDEC), R-8, 8S2, VOG8)
pins: 1 COMP (out), 2 VFB (in), 3 I SEN (in), 4 RT/CT (in), 5 GND, 6 OUT, 7 VCC (oc), 8 V REF (out)

## ULN2003A DIP-16
designator IC?, comment ULN2003A
High-Voltage, High-Current Darlington Array; Code: 5007-076; Designed by: TranLuyen
footprint DIP_16 (DIP, pitch 2.54mm, 300mil Width)
pins: 1 I1, 2 I2, 3 I3, 4 I4, 5 I5, 6 I6, 7 I7, 8 GND (power), 9 COM, 10 O7 (oc), 11 O6 (oc), 12 O5 (oc), 13 O4 (oc), 14 O3 (oc), 15 O2 (oc), 16 O1 (oc)

## ULN2003ADR-SOIC16
designator IC?, comment ULN2003ADR
High-Voltage, High-Current Darlington Array. SOIC16-9.9x3.9mm, 1.27mm; Code: 1704-015; Designed by: TranLuyen
footprint SO_16 (SOP, SOIC, 3.9mm width, 1.27mm pitch,)
pins: 1 I1, 2 I2, 3 I3, 4 I4, 5 I5, 6 I6, 7 I7, 8 GND (power), 9 COM, 10 O7 (oc), 11 O6 (oc), 12 O5 (oc), 13 O4 (oc), 14 O3 (oc), 15 O2 (oc), 16 O1 (oc)

## ULN2803 SOIC18
designator IC?, comment ULN2803
ULN2803ADWR - SOIC18 High-Voltage, High-Current Darlington Array; Code: 1704-014; Designed by: TranLuyen
footprint SO_18_W (SOP, SOIC, 7.5mm width, 1.27mm pitch,)
pins: 1 1B, 2 2B, 3 3B, 4 4B, 5 5B, 6 6B, 7 7B, 8 8B, 9 GND, 10 COM, 11 8C, 12 7C, 13 6C, 14 5C, 15 4C, 16 3C, 17 2C, 18 1C

## ULN2803APG DIP
designator IC?, comment ULN2803
ULN2803ADWR - SOIC18 High-Voltage, High-Current Darlington Array; Code: N/A
footprint DIP_18 (DIP, pitch 2.54mm, 300mil Width)
pins: 1 1B, 2 2B, 3 3B, 4 4B, 5 5B, 6 6B, 7 7B, 8 8B, 9 GND, 10 COM, 11 8C, 12 7C, 13 6C, 14 5C, 15 4C, 16 3C, 17 2C, 18 1C

## W25Q128JV SOIC 8 W
designator IC?, comment W25Q128JV
W25Q128JVSSIQ IC Flash 128MBIT; Code: 5015-093
footprint SO_8_W (SOIC Width, 5x5.3mm body 1.27mm pitch, 5.28mm SOIJ)
pins: 1 ~{CS}, 2 DO (IO1), 3 ~{WP} (IO2), 4 GND (power), 5 DI (IO0), 6 CLK, 7 ~{HOLD} (IO3), 8 VCC (power)

## XB7608AJ
designator IC?
One Cell Lithium-ion/Polymer Battery Protection IC; Designed by: TranLuyen; Code: N/A
footprint CPC5
pins: 1 VDD, 2 GND, 3 GND, 4 VM, 5 VM

## XSP06 ESSOP10
designator U?, comment XSP06
USB PD2.0/3.0, QC2.0/3.0, AFC; Designed by: Nhox; Code: N/A
footprint SSOP10 / ESSOP-10 (SSOP-10, ESSOP-10, 5x3.9mm body 1mm pitch)
pins: 0 AGND, 1 VDD, 2 MOD1, 3 MOD2, 4 DP, 5 DM, 6 CC2, 7 CC1, 8 TEST, 9 MOD3, 10 NC